# Altium footprint library CAP_Y.PcbLib: 1 footprints
Each footprint in its own frame and in the unit in brackets; x right, y up, seen from the top. Pads: shape width x height; smd on the part's side, far side on the other; paste and mask are expansions set on the pad; w line width, h text height; cw(c..) or ccw(c..) is an arc to the next point about the centre after c.
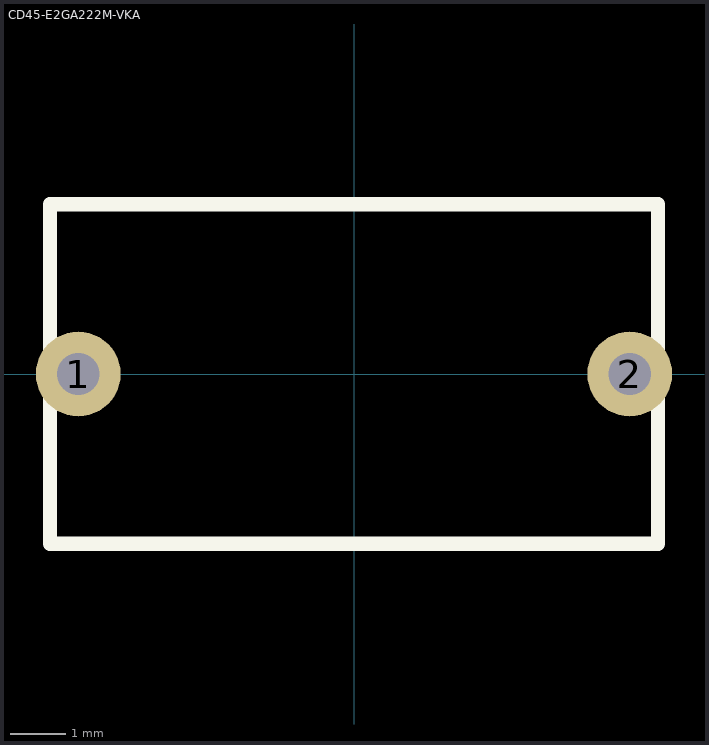
[diagram p0: the footprint, top view; thin cyan lines are the x and y axes]

## CD45-E2GA222M-VKA [mil] "CD45-E2GA222M-VKA"
pads (2):
  round 60 hole 30: 1(-195,0) 2(195,0)
Top Overlay:
  lines w10: -215,-120 215,-120 215,120 -215,120 -215,-120
3D body "CD45-E2GA222M-VKA.STEP": height 590.55, standoff -748.03, extent -212.59,-118.09 212.59,118.09